# Altium footprint library PBL - SMD Packages.PcbLib: 144 footprints (part 4 of 9)
Each footprint in its own frame and in the unit in brackets; x right, y up, seen from the top. Pads: shape width x height; smd on the part's side, far side on the other; paste and mask are expansions set on the pad; w line width, h text height; cw(c..) or ccw(c..) is an arc to the next point about the centre after c.
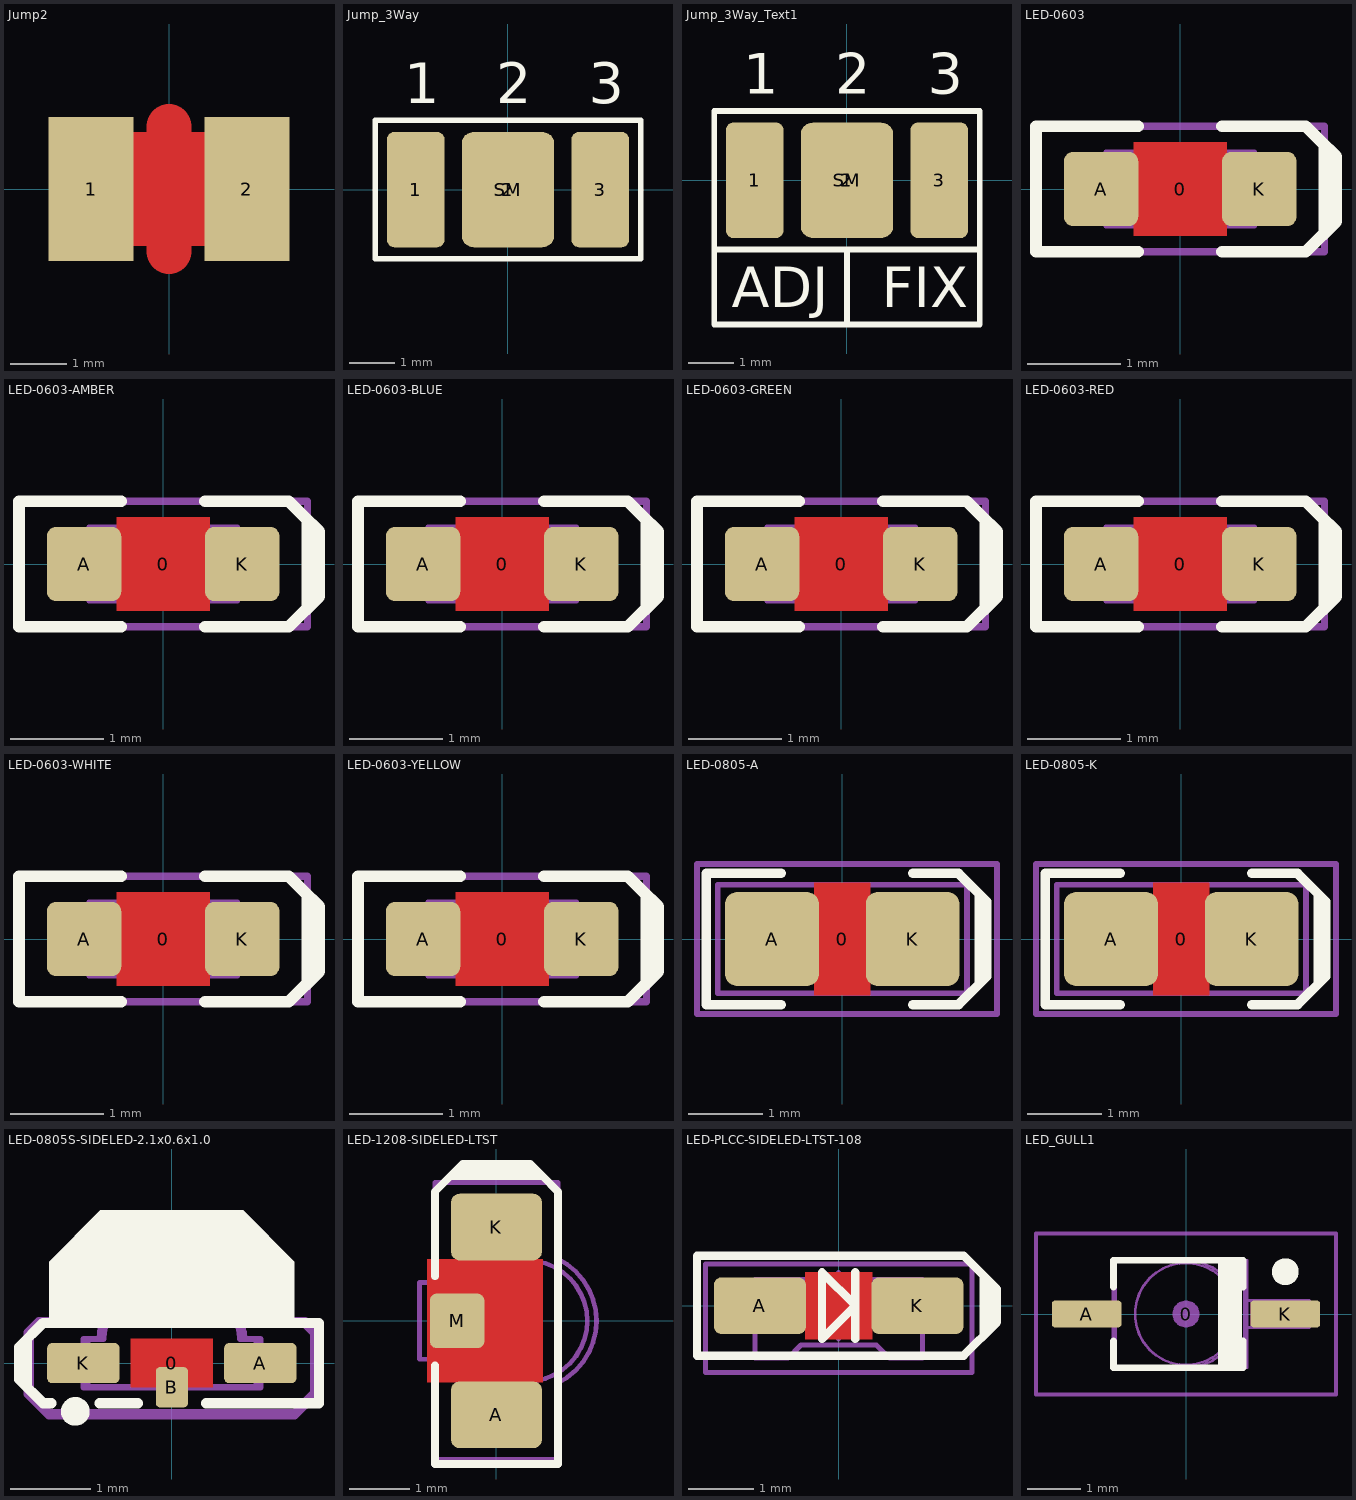
[diagram p3: the footprints below, top view; thin cyan lines are the x and y axes]

## Jump2 [mm] "SMT Battery jumper pads"
pads (2):
  rrect1% 1.5x2.54 smd paste-2: 1(-1.373,0) 2(1.373,0)
Top Layer:
  lines w0.8: 0,-1.1 0,1.1
  lines w1: -1,-0.5 1,-0.5 ; -1,0.5 1,0.5
Top Overlay:
  lines w0.127: -0.8,-1.1 -0.8,1.1 ; 0.8,-1.1 0.8,1.1

## Jump_3Way [mil] "SMT Battery jumper pads"
pads (4):
  rrect25% 50x100 smd: 1(-80,0) 3(80,0)
  rrect25% 80x100 smd: 2(0,0)
  rrect25% 218x108 on Top Solder: SM(0,0)
Top Overlay:
  lines w5: -115,-60 -115,60 115,60 115,-60 -115,-60
  text "1" at -90,75 h35
  text "2" at -10,75 h35
  text "3" at 70,75 h35
13 - 3D Top Side:
  lines w3: -115,-60 -115,60 115,60 115,-60 -115,-60

## Jump_3Way_Text1 [mil] "SMT jumper for fixed or variable"
pads (4):
  rrect25% 50x100 smd: 1(-80,0) 3(80,0)
  rrect25% 80x100 smd: 2(0,0)
  rrect25% 218x108 on Top Solder: SM(0,0)
Top Overlay:
  lines w5: 0,-125 0,-60 ; -115,-60 -115,-125 115,-125 115,-60 ; -115,-60 -115,60 115,60 115,-60 ; -115,-60 115,-60
  text "FIX" at 30,-110 h35
  text "ADJ" at -100,-110 h35
  text "1" at -90,75 h35
  text "2" at -10,75 h35
  text "3" at 70,75 h35
13 - 3D Top Side:
  lines w3: -115,-60 -115,60 115,60 115,-60 -115,-60

## LED-0603 [mm]
height 0.8
pads (3):
  round 0.254 on Mech15: 0(0,0)
  rrect25% 0.8x0.8 smd: A(-0.85,0) K(0.85,0)
Top Layer:
  pour cut-out: -0.5,0.5 0.5,0.5 0.5,-0.5 -0.5,-0.5
Top Overlay:
  lines w0.127: -0.45,-0.675 -1.55,-0.675 -1.55,0.675 -0.45,0.675 ; 0.45,-0.675 1.35,-0.675 1.55,-0.475 1.55,0.475 1.35,0.675 0.45,0.675 ; 1.5,0.525 1.675,0.35 1.675,-0.35 1.525,-0.5
13 - 3D Top Side:
  lines w0.05: -0.6,-0.4 -0.6,0.399 0.6,0.4 0.6,-0.4 -0.6,-0.399 ; -0.505,-0.398 -0.505,0.398 ; -0.5,-0.4 -0.8,-0.4 -0.8,0.4 -0.5,0.4 ; 0.5,-0.4 0.8,-0.4 0.8,0.4 0.5,0.4 ; 0.505,-0.398 0.505,0.398 ; -0.599,-0.398 0.599,-0.398 0.599,0.398 -0.599,0.398 -0.599,-0.398
15 - Top Courtyards:
  lines w0.076: -1.55,-0.675 1.55,-0.675 1.55,0.675 -1.55,0.675 -1.55,-0.675
3D body: height 0.75, standoff 0, extent -0.8,-0.4 0.8,0.4

## LED-0603-AMBER [mm]
height 0.8
pads (3):
  round 0.254 on Mech15: 0(0,0)
  rrect25% 0.8x0.8 smd: A(-0.85,0) K(0.85,0)
Top Layer:
  pour cut-out: -0.5,0.5 0.5,0.5 0.5,-0.5 -0.5,-0.5
Top Overlay:
  lines w0.127: -0.45,-0.675 -1.55,-0.675 -1.55,0.675 -0.45,0.675 ; 0.45,-0.675 1.35,-0.675 1.55,-0.475 1.55,0.475 1.35,0.675 0.45,0.675 ; 1.5,0.525 1.675,0.35 1.675,-0.35 1.525,-0.5
13 - 3D Top Side:
  lines w0.05: -0.6,-0.4 -0.6,0.399 0.6,0.4 0.6,-0.4 -0.6,-0.399 ; -0.505,-0.398 -0.505,0.398 ; -0.5,-0.4 -0.8,-0.4 -0.8,0.4 -0.5,0.4 ; 0.5,-0.4 0.8,-0.4 0.8,0.4 0.5,0.4 ; 0.505,-0.398 0.505,0.398 ; -0.599,-0.398 0.599,-0.398 0.599,0.398 -0.599,0.398 -0.599,-0.398
15 - Top Courtyards:
  lines w0.076: -1.55,-0.675 -1.55,0.675 1.55,0.675 1.55,-0.675 -1.55,-0.675
3D body: height 0.75, standoff 0, extent -0.8,-0.4 0.8,0.4

## LED-0603-BLUE [mm]
height 0.8
pads (3):
  round 0.254 on Mech15: 0(0,0)
  rrect25% 0.8x0.8 smd: A(-0.85,0) K(0.85,0)
Top Layer:
  pour cut-out: -0.5,0.5 0.5,0.5 0.5,-0.5 -0.5,-0.5
Top Overlay:
  lines w0.127: -0.45,-0.675 -1.55,-0.675 -1.55,0.675 -0.45,0.675 ; 0.45,-0.675 1.35,-0.675 1.55,-0.475 1.55,0.475 1.35,0.675 0.45,0.675 ; 1.5,0.525 1.675,0.35 1.675,-0.35 1.525,-0.5
13 - 3D Top Side:
  lines w0.05: -0.6,-0.4 -0.6,0.399 0.6,0.4 0.6,-0.4 -0.6,-0.399 ; -0.505,-0.398 -0.505,0.398 ; -0.5,-0.4 -0.8,-0.4 -0.8,0.4 -0.5,0.4 ; 0.5,-0.4 0.8,-0.4 0.8,0.4 0.5,0.4 ; 0.505,-0.398 0.505,0.398 ; -0.599,-0.398 0.599,-0.398 0.599,0.398 -0.599,0.398 -0.599,-0.398
15 - Top Courtyards:
  lines w0.076: -1.55,-0.675 1.55,-0.675 1.55,0.675 -1.55,0.675 -1.55,-0.675
3D body: height 0.75, standoff 0, extent -0.8,-0.4 0.8,0.4

## LED-0603-GREEN [mm]
height 0.8
pads (3):
  round 0.254 on Mech15: 0(0,0)
  rrect25% 0.8x0.8 smd: A(-0.85,0) K(0.85,0)
Top Layer:
  pour cut-out: -0.5,0.5 0.5,0.5 0.5,-0.5 -0.5,-0.5
Top Overlay:
  lines w0.127: -0.45,-0.675 -1.55,-0.675 -1.55,0.675 -0.45,0.675 ; 0.45,-0.675 1.35,-0.675 1.55,-0.475 1.55,0.475 1.35,0.675 0.45,0.675 ; 1.5,0.525 1.675,0.35 1.675,-0.35 1.525,-0.5
13 - 3D Top Side:
  lines w0.05: -0.6,-0.4 -0.6,0.399 0.6,0.4 0.6,-0.4 -0.6,-0.399 ; -0.505,-0.398 -0.505,0.398 ; -0.5,-0.4 -0.8,-0.4 -0.8,0.4 -0.5,0.4 ; 0.5,-0.4 0.8,-0.4 0.8,0.4 0.5,0.4 ; 0.505,-0.398 0.505,0.398 ; -0.599,-0.398 -0.599,0.398 0.599,0.398 0.599,-0.398 -0.599,-0.398
15 - Top Courtyards:
  lines w0.076: -1.55,-0.675 1.55,-0.675 1.55,0.675 -1.55,0.675 -1.55,-0.675
3D body: height 0.75, standoff 0, extent -0.8,-0.4 0.8,0.4

## LED-0603-RED [mm]
height 0.8
pads (3):
  round 0.254 on Mech15: 0(0,0)
  rrect25% 0.8x0.8 smd: A(-0.85,0) K(0.85,0)
Top Layer:
  pour cut-out: -0.5,0.5 0.5,0.5 0.5,-0.5 -0.5,-0.5
Top Overlay:
  lines w0.127: -0.45,-0.675 -1.55,-0.675 -1.55,0.675 -0.45,0.675 ; 0.45,-0.675 1.35,-0.675 1.55,-0.475 1.55,0.475 1.35,0.675 0.45,0.675 ; 1.5,0.525 1.675,0.35 1.675,-0.35 1.525,-0.5
13 - 3D Top Side:
  lines w0.05: -0.6,-0.4 -0.6,0.399 0.6,0.4 0.6,-0.4 -0.6,-0.399 ; -0.505,-0.398 -0.505,0.398 ; -0.5,-0.4 -0.8,-0.4 -0.8,0.4 -0.5,0.4 ; 0.5,-0.4 0.8,-0.4 0.8,0.4 0.5,0.4 ; 0.505,-0.398 0.505,0.398 ; -0.599,-0.398 -0.599,0.398 0.599,0.398 0.599,-0.398 -0.599,-0.398
15 - Top Courtyards:
  lines w0.076: -1.55,-0.675 1.55,-0.675 1.55,0.675 -1.55,0.675 -1.55,-0.675
3D body: height 0.75, standoff 0, extent -0.8,-0.4 0.8,0.4

## LED-0603-WHITE [mm]
height 0.8
pads (3):
  round 0.254 on Mech15: 0(0,0)
  rrect25% 0.8x0.8 smd: A(-0.85,0) K(0.85,0)
Top Layer:
  pour cut-out: -0.5,0.5 0.5,0.5 0.5,-0.5 -0.5,-0.5
Top Overlay:
  lines w0.127: -0.45,-0.675 -1.55,-0.675 -1.55,0.675 -0.45,0.675 ; 0.45,-0.675 1.35,-0.675 1.55,-0.475 1.55,0.475 1.35,0.675 0.45,0.675 ; 1.5,0.525 1.675,0.35 1.675,-0.35 1.525,-0.5
13 - 3D Top Side:
  lines w0.05: -0.6,-0.4 -0.6,0.399 0.6,0.4 0.6,-0.4 -0.6,-0.399 ; -0.505,-0.398 -0.505,0.398 ; -0.5,-0.4 -0.8,-0.4 -0.8,0.4 -0.5,0.4 ; 0.5,-0.4 0.8,-0.4 0.8,0.4 0.5,0.4 ; 0.505,-0.398 0.505,0.398 ; -0.599,-0.398 -0.599,0.398 0.599,0.398 0.599,-0.398 -0.599,-0.398
15 - Top Courtyards:
  lines w0.076: -1.55,-0.675 1.55,-0.675 1.55,0.675 -1.55,0.675 -1.55,-0.675
3D body: height 0.75, standoff 0, extent -0.8,-0.4 0.8,0.4

## LED-0603-YELLOW [mm]
height 0.8
pads (3):
  round 0.254 on Mech15: 0(0,0)
  rrect25% 0.8x0.8 smd: A(-0.85,0) K(0.85,0)
Top Layer:
  pour cut-out: -0.5,0.5 0.5,0.5 0.5,-0.5 -0.5,-0.5
Top Overlay:
  lines w0.127: -0.45,-0.675 -1.55,-0.675 -1.55,0.675 -0.45,0.675 ; 0.45,-0.675 1.35,-0.675 1.55,-0.475 1.55,0.475 1.35,0.675 0.45,0.675 ; 1.5,0.525 1.675,0.35 1.675,-0.35 1.525,-0.5
13 - 3D Top Side:
  lines w0.05: -0.6,-0.4 -0.6,0.399 0.6,0.4 0.6,-0.4 -0.6,-0.399 ; -0.505,-0.398 -0.505,0.398 ; -0.5,-0.4 -0.8,-0.4 -0.8,0.4 -0.5,0.4 ; 0.5,-0.4 0.8,-0.4 0.8,0.4 0.5,0.4 ; 0.505,-0.398 0.505,0.398 ; -0.599,-0.398 -0.599,0.398 0.599,0.398 0.599,-0.398 -0.599,-0.398
15 - Top Courtyards:
  lines w0.076: -1.55,-0.675 -1.55,0.675 1.55,0.675 1.55,-0.675 -1.55,-0.675
3D body: height 0.75, standoff 0, extent -0.8,-0.4 0.8,0.4

## LED-0805-A [mil]
height 31.5
pads (3):
  round 20 on Mech15: 0(0,0)
  rrect25% 50x50 smd: A(-37.5,0) K(37.5,0)
Top Layer:
  pour cut-out: -15,30 15,30 15,-30 -15,-30
Top Overlay:
  lines w5: -32.5,-35 -72.5,-35 -72.5,35 -32.5,35 ; 37.5,-35 62,-35 77,-20 77,20 62,35 37.5,35 ; 73,-24 73,24
13 - 3D Top Side:
  lines w3: -66.5,-29 66.5,-29 66.5,29 -66.5,29 -66.5,-29
15 - Top Courtyards:
  lines w3: -77.5,-40 82.5,-40 82.5,40 -77.5,40 -77.5,-40
3D body: height 31.5, standoff 11.81, extent -26.49,-24.61 28.65,24.6
3D body: height 11.81, standoff 3.94, extent -39.37,-24.61 39.37,24.61
3D body: height 3.94, standoff 0, extent -39.37,-24.61 39.37,24.61
3D body: height 3.94, standoff 0, extent -11.81,-15.75 11.81,15.75

## LED-0805-K [mil]
height 31.5
pads (3):
  round 20 on Mech15: 0(0,0)
  rrect25% 50x50 smd: A(-37.5,0) K(37.5,0)
Top Layer:
  pour cut-out: -15,30 15,30 15,-30 -15,-30
Top Overlay:
  lines w5: -32.5,-35 -72.5,-35 -72.5,35 -32.5,35 ; 37.5,-35 62,-35 77,-20 77,20 62,35 37.5,35 ; 73,-24 73,24
13 - 3D Top Side:
  lines w3: -66.5,-29 66.5,-29 66.5,29 -66.5,29 -66.5,-29
15 - Top Courtyards:
  lines w3: -77.5,-40 82.5,-40 82.5,40 -77.5,40 -77.5,-40
3D body: height 31.5, standoff 11.81, extent -28.65,-24.6 26.49,24.61
3D body: height 11.81, standoff 3.94, extent -39.37,-24.61 39.37,24.61
3D body: height 3.94, standoff 0, extent -39.37,-24.61 39.37,24.61
3D body: height 3.94, standoff 0, extent -11.81,-15.75 11.81,15.75

## LED-0805S-SIDELED-2.1x0.6x1.0 [mm] "Lite-On Inc PLCC Side LED"
height 0.8
pads (4):
  round 0.508 on Mech15: 0(0,0)
  rrect25% 0.9x0.5 smd: A(1.1,0) K(-1.1,0)
  rrect25% 0.4x0.5 smd: B(0,-0.3)
Top Layer:
  pour cut-out: -0.508,0.3 0.508,0.3 0.508,-0.3 -0.508,-0.3
Top Overlay:
  circle w0.203: c-1.2,-0.6 r0.076
  region: -1.524,0.5 1.524,0.5 1.524,1.262 0.889,1.897 -0.889,1.897 -1.524,1.262
  lines w0.127: -1.8,-0.3 -1.8,0.3 ; -1.5,-0.5 -1.6,-0.5 -1.9,-0.2 -1.9,0.2 -1.6,0.5 1.829,0.5 1.829,-0.5 0.425,-0.5 ; -0.9,-0.5 -0.425,-0.5
13 - 3D Top Side:
  lines w0.076: -1.05,-0.3 1.05,-0.3 1.05,0.3 0.85,0.3 ccw(c0.3,0.3) 0.3,0.85 -0.3,0.85 ccw(c-0.3,0.3) -0.85,0.3 -1.05,0.3 -1.05,-0.3
15 - Top Courtyards:
  lines w0.076: -1.1,-0.3 -1.1,0.3 -0.9,0.3 cw(c-0.35,0.3) -0.35,0.85 0.35,0.85 cw(c0.35,0.3) 0.9,0.3 1.1,0.3 1.1,-0.3 -1.1,-0.3
  lines w0.127: -1.778,-0.381 -1.524,-0.635 1.524,-0.635 1.778,-0.381 1.778,0.381 1.651,0.508 1.27,0.508 0.762,1.016 -0.762,1.016 -1.27,0.508 -1.651,0.508 -1.778,0.381 -1.778,-0.381
3D body: height 0.7, standoff 0, extent -1.1,-0.3 1.1,0.8

## LED-1208-SIDELED-LTST [mm] "Lite-On Inc 1208 SMD Side LED"
height 1
pads (3):
  rrect25% 1.5x1.1 smd: A(0,-1.55) K(0,1.55)
  rrect25% 0.9x0.9 smd: M(-0.65,0)
Top Layer:
  pour cut-out: -1.143,1.016 0.762,1.016 0.762,-1.016 -1.143,-1.016
Top Overlay:
  lines w0.127: -1.016,-0.737 -1.016,-2.362 1.016,-2.362 1.016,2.134 0.762,2.388 ; -1.016,0.737 -1.016,2.134 -0.762,2.388 ; -0.686,2.464 -0.559,2.591 0.559,2.591 0.66,2.489 ; -0.762,2.388 -0.66,2.489 0.66,2.489 ; -0.762,2.388 0.762,2.388 ; 0.66,2.489 0.762,2.388
13 - 3D Top Side:
  lines w0.076: -0.5,-1.5 0.5,-1.5 0.5,-1 ccw(c0.5,0) 1.5,0 ccw(c0.5,0) 0.5,1 0.5,1.5 -0.5,1.5 -0.5,-1.5
15 - Top Courtyards:
  lines w0.076: -0.508,0 0.508,0 ; 0,-0.508 0,0.508 ; 1.009,-1.027 ccw(c0.508,0) 1.009,1.027 ; 1.016,-1.023 1.016,-2.286 -1.016,-2.286 -1.016,-0.635 -1.27,-0.635 -1.27,0.635 -1.016,0.635 -1.016,2.286 1.016,2.286 1.016,1.023
3D body: height 1, standoff 0, extent 0.5,-1.009 1.509,1.009
3D body: height 1, standoff 0, extent -0.5,-1.5 0.5,1.5

## LED-PLCC-SIDELED-LTST-108 [mm] "Lite-On Inc PLCC Side LED"
height 0.8
pads (2):
  rrect25% 1.4x0.86 smd: A(-1.2,0) K(1.2,0)
Top Layer:
  pour cut-out: -0.508,0.508 0.508,0.508 0.508,-0.508 -0.508,-0.508
Top Overlay:
  lines w0.127: 0.254,-0.508 0.254,0.508 ; 2.21,-0.457 2.21,0.457 ; 2.311,-0.356 2.311,0.356 ; -2.159,-0.762 1.905,-0.762 2.413,-0.254 2.413,0.254 1.905,0.762 -2.159,0.762 -2.159,-0.762 ; -0.254,-0.508 -0.254,0.508 0.254,0 -0.254,-0.508
13 - 3D Top Side:
  lines w0.076: -1.275,-0.8 -1.275,0.4 1.275,0.4 1.275,-0.8 0.775,-0.8 0.575,-0.6 -0.575,-0.6 -0.775,-0.8 -1.275,-0.8
15 - Top Courtyards:
  lines w0.076: -0.508,0 0.508,0 ; 0,-0.508 0,0.508 ; -2.032,-1.016 2.032,-1.016 2.032,0.635 -2.032,0.635 -2.032,-1.016
3D body: height 0.15, standoff 0, extent 0.725,-0.3 1.425,0.3
3D body: height 0.15, standoff 0, extent -1.425,-0.3 -0.725,0.3
3D body: height 0.8, standoff 0, extent -1.275,-0.8 1.275,0.4

## LED_GULL1 [mm]
pads (3):
  round 0.508 on Mech15: 0(0,0)
  rrect25% 1.3x0.5 smd: A(-1.85,0) K(1.85,0)
Top Overlay:
  circle w0.4: c1.85,0.788 r0.05
  rectangle: 0.6,-1 1.041,1
  lines w0.127: -1.35,-0.5 -1.35,-1 1.067,-1 1.067,-0.5 ; -1.35,0.5 -1.35,1 1.067,1 1.067,0.5
13 - 3D Top Side:
  circle w0.05: c0,0 r0.95
  lines w0.05: -1.9,-0.2 -1.9,0.2 ; -1.77,-0.2 -1.77,0.2 ; -1.499,-0.2 -1.499,0.2 ; -1.36,-0.2 -2.3,-0.2 -2.3,0.2 -1.36,0.2 ; -1.31,-1 -1.31,1 ; -0.001,-1 ccw(c0,0) 0.001,1 ; 1.09,-1 1.09,1 ; 1.14,-0.25 2.3,-0.25 2.3,0.25 1.14,0.25 ; 1.23,-0.25 1.23,0.25 ; 1.499,-0.25 1.499,0.25 ; 1.77,-0.25 1.77,0.25 ; 1.9,-0.25 1.9,0.25 ; -1.36,-1 1.14,-1 1.14,1 -1.36,1 -1.36,-1
15 - Top Courtyards:
  lines w0.076: -2.794,-1.5 -2.794,1.5 2.794,1.5 2.794,-1.5 -2.794,-1.5
3D body: height 2.76, standoff 0, extent -2.3,-1 2.3,1